# Altium footprint library Footprint-Lib-PhilsLab.PcbLib: 544 footprints (part 16 of 34)
Each footprint in its own frame and in the unit in brackets; x right, y up, seen from the top. Pads: shape width x height; smd on the part's side, far side on the other; paste and mask are expansions set on the pad; w line width, h text height; cw(c..) or ccw(c..) is an arc to the next point about the centre after c.
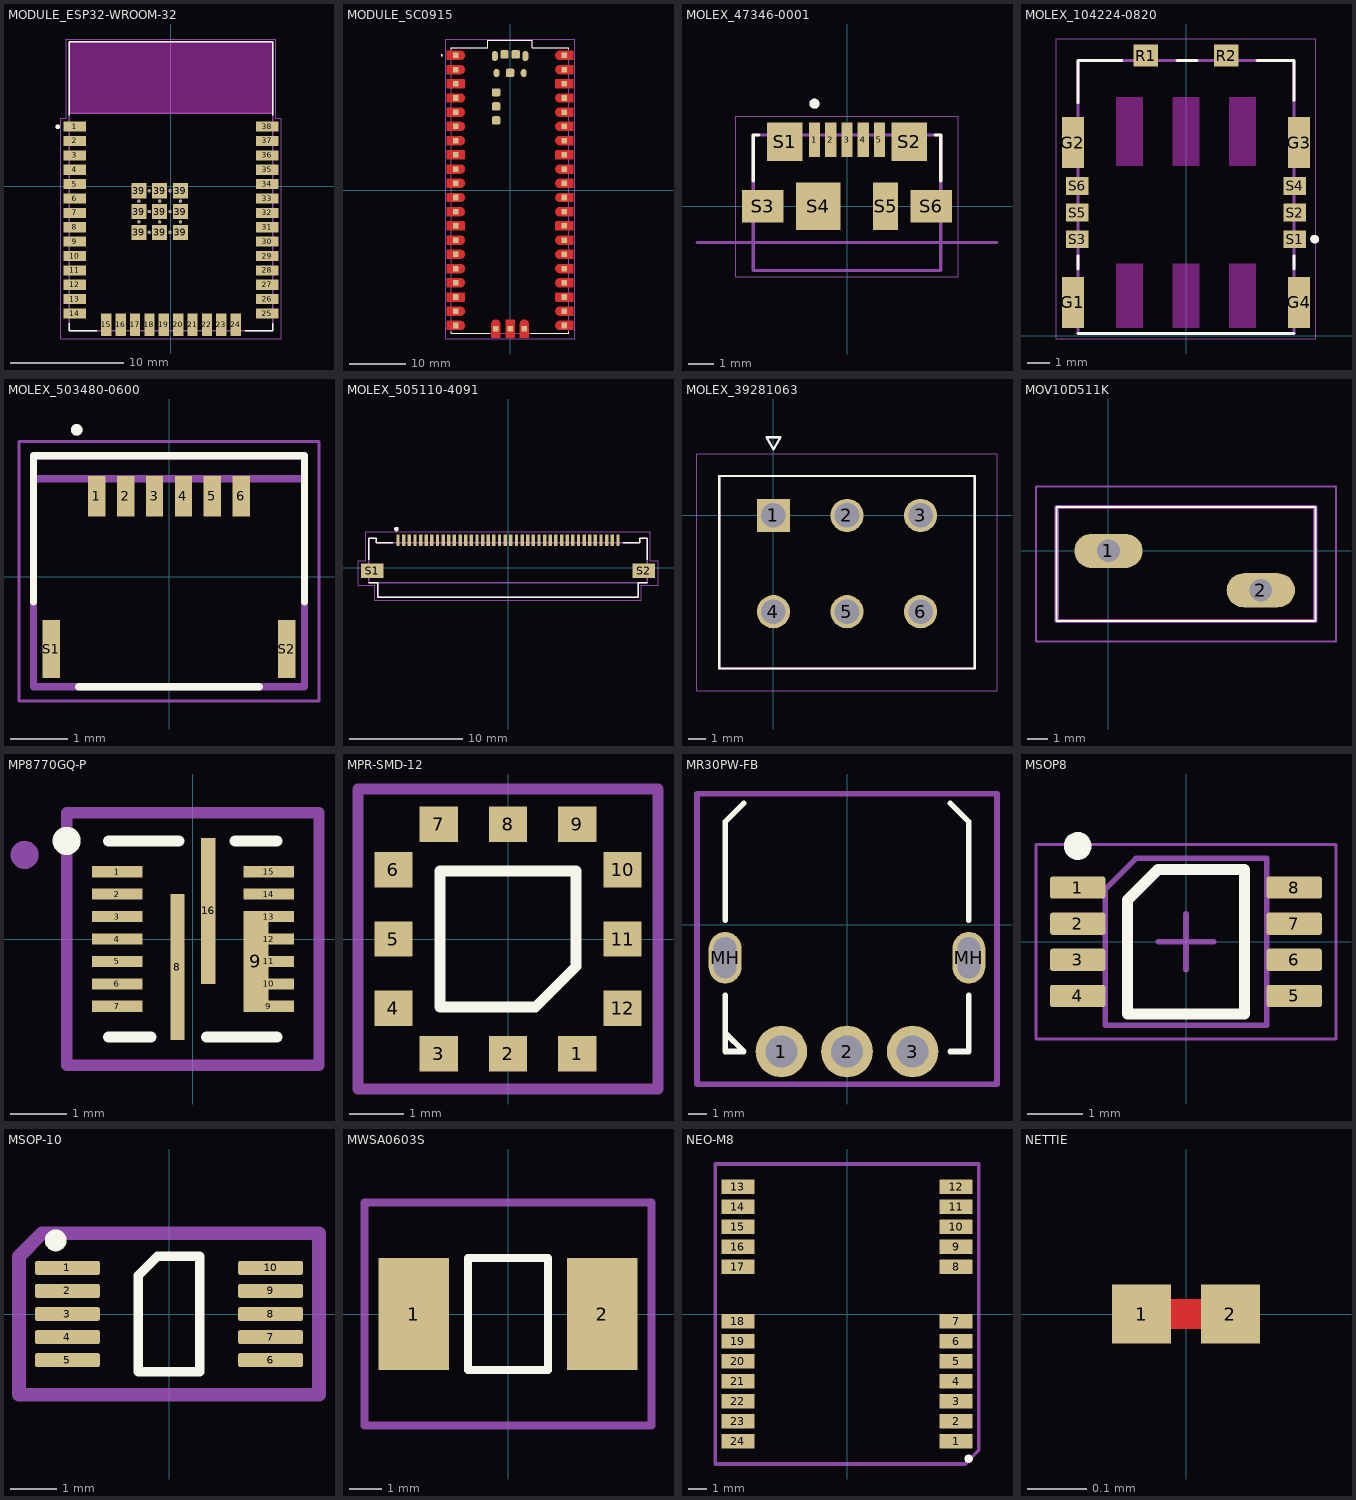
[diagram p15: the footprints below, top view; thin cyan lines are the x and y axes]

## MODULE_ESP32-WROOM-32 [mm]
height 3.2
pads (59):
  rect 2x0.9 smd: 1(-8.5,5.26) 2(-8.5,3.99) 3(-8.5,2.72) 4(-8.5,1.45) 5(-8.5,0.18) 6(-8.5,-1.09) 7(-8.5,-2.36) 8(-8.5,-3.63) 9(-8.5,-4.9) 10(-8.5,-6.17) 11(-8.5,-7.44) 12(-8.5,-8.71) 13(-8.5,-9.98) 14(-8.5,-11.25) 25(8.5,-11.25) 26(8.5,-9.98) 27(8.5,-8.71) 28(8.5,-7.44) 29(8.5,-6.17) 30(8.5,-4.9) 31(8.5,-3.63) 32(8.5,-2.36) 33(8.5,-1.09) 34(8.5,0.18) 35(8.5,1.45) 36(8.5,2.72) 37(8.5,3.99) 38(8.5,5.26)
  rect 0.9x2 smd: 15(-5.715,-12.25) 16(-4.445,-12.25) 17(-3.175,-12.25) 18(-1.905,-12.25) 19(-0.635,-12.25) 20(0.635,-12.25) 21(1.905,-12.25) 22(3.175,-12.25) 23(4.445,-12.25) 24(5.715,-12.25)
  rect 1.33x1.33 smd: 39(-2.835,-4.075) 39(-2.835,-2.24) 39(-2.835,-0.405) 39(-1,-4.075) 39(-1,-2.24) 39(-1,-0.405) 39(0.835,-4.075) 39(0.835,-2.24) 39(0.835,-0.405)
  round 0.3 hole 0.2: 39(-2.835,-3.157) 39(-2.835,-1.322) 39(-1.917,-4.075) 39(-1.917,-2.24) 39(-1.917,-0.405) 39(-1,-3.157) 39(-1,-1.322) 39(-0.082,-4.075) 39(-0.082,-2.24) 39(-0.082,-0.405) 39(0.835,-3.157) 39(0.835,-1.322)
Top Overlay:
  circle w0.2: c-10,5.25 r0.1
  lines w0.127: -9,-12.1 -9,-12.75 -6.55,-12.75 ; -9,6.25 -9,12.75 9,12.75 9,6.25 ; 6.55,-12.75 9,-12.75 9,-12.1
Keep-Out Layer:
  region: 9,6.45 -9,6.45 -9,12.75 9,12.75
  region: 9,6.45 -9,6.45 -9,12.75 9,12.75
Mechanical 13:
  circle w0.2: c-10,5.25 r0.1
  lines w0.127: -9,6.45 -9,-12.75 9,-12.75 9,6.45 ; -9,6.45 -9,12.75 9,12.75 9,6.45 ; -9,6.45 9,6.45
  text "ANTENNA" at -6,9 h1.78
Mechanical 15:
  lines w0.05: -9.75,-13.5 9.75,-13.5 9.75,6 9.25,6 9.25,13 -9.25,13 -9.25,6 -9.75,6 -9.75,-13.5
3D body "step_temp.STEP": height 3.2, standoff 0, extent -9,-12.75 9,12.75

## MODULE_SC0915 [mm]
pads (53):
  rect 1x1 smd paste-1 mask+0: 1(-9.69,24.13) 2(-9.69,21.59) 3(-9.69,19.05) 4(-9.69,16.51) 5(-9.69,13.97) 6(-9.69,11.43) 7(-9.69,8.89) 8(-9.69,6.35) 9(-9.69,3.81) 10(-9.69,1.27) 11(-9.69,-1.27) 12(-9.69,-3.81) 13(-9.69,-6.35) 14(-9.69,-8.89) 15(-9.69,-11.43) 16(-9.69,-13.97) 17(-9.69,-16.51) 18(-9.69,-19.05) 19(-9.69,-21.59) 20(-9.69,-24.13) 21(9.69,-24.13) 22(9.69,-21.59) 23(9.69,-19.05) 24(9.69,-16.51) 25(9.69,-13.97) 26(9.69,-11.43) 27(9.69,-8.89) 28(9.69,-6.35) 29(9.69,-3.81) 30(9.69,-1.27) 31(9.69,1.27) 32(9.69,3.81) 33(9.69,6.35) 34(9.69,8.89) 35(9.69,11.43) 36(9.69,13.97) 37(9.69,16.51) 38(9.69,19.05) 39(9.69,21.59) 40(9.69,24.13) D1(-2.54,-24.7) D2(0,-24.7) D3(2.54,-24.7)
  oval 1.1x1.8 smd: A(-2.725,24) B(2.725,24)
  oval 1.05x1.45 smd: C(-2.425,20.97) D(2.425,20.97)
  rrect40% 1.5x1.5 smd: TP1(0,21) TP2(1,24.3) TP3(-1,24.3) TP4(-2.5,17.5) TP5(-2.5,15) TP6(-2.5,12.5)
Top Layer:
  drawing of 43 lines, arcs and shapes, not listed
Top Overlay:
  circle w0.2: c-12.19,24.13 r0.1
  lines w0.127: -10.5,-25.25 -10.5,-25.5 -3.66,-25.5 ; -10.5,25.25 -10.5,25.5 -4,25.5 -4,26.8 4,26.8 4,25.5 10.5,25.5 10.5,25.25 ; 3.66,-25.5 10.5,-25.5 10.5,-25.25
Top Paste:
  drawing of 43 lines, arcs and shapes, not listed
Top Solder:
  drawing of 43 lines, arcs and shapes, not listed
Mechanical 13:
  circle w0.2: c-12.19,24.13 r0.1
  lines w0.127: -10.5,-25.5 -10.5,25.5 -4,25.5 -4,26.8 4,26.8 4,25.5 10.5,25.5 10.5,-25.5 -10.5,-25.5
Mechanical 15:
  lines w0.05: -11.54,-26.55 -11.54,27.05 11.54,27.05 11.54,-26.55 -11.54,-26.55
3D body "step_temp.STEP": height 3.73, standoff 0, extent -10.5,-25.5 10.5,26.8

## MOLEX_47346-0001 [mm]
height 2.94
pads (11):
  rect 0.45x1.38 smd: 1(-1.3,2.66) 2(-0.65,2.66) 3(0,2.66) 4(0.65,2.66) 5(1.3,2.66)
  rect 1.425x1.55 smd: S1(-2.488,2.575) S2(2.488,2.575)
  rect 1.65x1.3 smd: S3(-3.375,0) S6(3.375,0)
  rect 1.8x1.9 smd: S4(-1.15,0)
  rect 1x1.9 smd: S5(1.55,0)
Top Overlay:
  circle w0.2: c-1.3,4.1 r0.1
  lines w0.127: -3.75,1 -3.75,2.85 -3.52,2.85 ; 3.52,2.85 3.75,2.85 3.75,1
Mechanical 13:
  circle w0.2: c-1.3,4.1 r0.1
  lines w0.127: -6,-1.45 6,-1.45 ; -3.75,-2.58 3.75,-2.58 3.75,2.85 -3.75,2.85 -3.75,-2.58
  text "PCB EDGE" at 4.5,-1.25 h0.41
Mechanical 15:
  lines w0.05: -4.45,-2.83 -4.45,3.6 4.45,3.6 4.45,-2.83 -4.45,-2.83
3D body "step_temp.STEP": height 2.7, standoff -0.25, extent -4.18,-2.93 4.18,2.5

## MOLEX_104224-0820 [mm]
pads (12):
  rect 1x2.3 smd: G1(-5.1,1.5) G2(-5.1,8.7) G3(5.1,8.7) G4(5.1,1.5)
  rect 1.1x1 smd: R1(-1.82,12.625) R2(1.82,12.625)
  rect 1x0.8 smd: S1(4.9,4.35) S2(4.9,5.55) S3(-4.9,4.35) S4(4.9,6.75) S5(-4.9,5.55) S6(-4.9,6.75)
Top Overlay:
  circle w0.2: c5.8,4.35 r0.1
  lines w0.127: -4.875,0.1 4.875,0.1 ; -4.875,3 -4.875,3.6 ; -4.875,10.5 -4.875,12.4 -2.9,12.4 ; -0.4,12.4 0.5,12.4 ; 3.2,12.4 4.875,12.4 4.875,10.6 ; 4.875,3 4.875,3.6
Keep-Out Layer:
  region: 3.14,7.652 1.94,7.652 1.94,10.75 3.14,10.75
  region: -1.94,7.656 -3.142,7.656 -3.142,10.75 -1.94,10.75
  region: 0.6,7.663 -0.601,7.663 -0.601,10.75 0.6,10.75
  region: 3.14,0.351 1.943,0.351 1.943,3.25 3.14,3.25
  region: -1.94,0.351 -3.146,0.351 -3.146,3.25 -1.94,3.25
  region: 0.6,0.35 -0.601,0.35 -0.601,3.25 0.6,3.25
Mechanical 13:
  lines w0.127: -4.9,0.6 -5.275,0.6 -5.275,2.4 -4.9,2.4 ; -4.9,4.15 -5.1,4.15 -5.1,4.55 -4.9,4.55 ; -4.9,5.35 -5.1,5.35 -5.1,5.75 -4.9,5.75 ; -4.9,6.55 -5.1,6.55 -5.1,6.95 -4.9,6.95 ; -4.9,7.8 -5.275,7.8 -5.275,9.6 -4.9,9.6 ; 4.9,0.6 5.275,0.6 5.275,2.4 4.9,2.4 ; 4.9,4.15 5.1,4.15 5.1,4.55 4.9,4.55 ; 4.9,5.35 5.1,5.35 5.1,5.75 4.9,5.75 ; 4.9,6.55 5.1,6.55 5.1,6.95 4.9,6.95 ; 4.9,7.8 5.275,7.8 5.275,9.6 4.9,9.6 ; -2.12,12.4 -2.12,12.8 -1.52,12.8 -1.52,12.4 ; -2.12,12.4 -1.52,12.4 ; -2.12,12.4 -4.875,12.4 -4.875,0.1 4.875,0.1 4.875,12.4 2.12,12.4 ; -1.52,12.4 1.52,12.4 ; 1.52,12.4 1.52,12.8 2.12,12.8 2.12,12.4 ; 1.52,12.4 2.12,12.4
Mechanical 15:
  lines w0.05: -5.85,-0.15 -5.85,13.375 5.85,13.375 5.85,-0.15 -5.85,-0.15
3D body "step_temp.STEP": height 1.21, standoff 0, extent -5.2,-0.025 5.15,12.625

## MOLEX_503480-0600 [mm]
pads (8):
  rect 0.3x0.7 smd: 1(-1.25,1.4) 2(-0.75,1.4) 3(-0.25,1.4) 4(0.25,1.4) 5(0.75,1.4) 6(1.25,1.4)
  rect 0.3x1 smd: S1(-2.04,-1.25) S2(2.04,-1.25)
Top Overlay:
  circle w0.1: c-1.6,2.55 r0.05
  lines w0.127: -2.35,-0.43 -2.35,2.1 2.35,2.1 2.35,-0.43 ; -1.57,-1.9 1.57,-1.9
Mechanical 13:
  circle w0.1: c-1.6,2.55 r0.05
  lines w0.127: -2.35,1.7 -2.35,2.1 2.35,2.1 2.35,1.7 ; -2.35,1.7 -2.35,-1.9 2.35,-1.9 2.35,1.7 ; -2.35,1.7 2.35,1.7
Mechanical 15:
  lines w0.05: -2.6,-2.15 2.6,-2.15 2.6,2.35 -2.6,2.35 -2.6,-2.15

## MOLEX_505110-4091 [mm]
pads (42):
  rect 0.3x1 smd: 1(-9.75,2.425) 2(-9.25,2.425) 3(-8.75,2.425) 4(-8.25,2.425) 5(-7.75,2.425) 6(-7.25,2.425) 7(-6.75,2.425) 8(-6.25,2.425) 9(-5.75,2.425) 10(-5.25,2.425) 11(-4.75,2.425) 12(-4.25,2.425) 13(-3.75,2.425) 14(-3.25,2.425) 15(-2.75,2.425) 16(-2.25,2.425) 17(-1.75,2.425) 18(-1.25,2.425) 19(-0.75,2.425) 20(-0.25,2.425) 21(0.25,2.425) 22(0.75,2.425) 23(1.25,2.425) 24(1.75,2.425) 25(2.25,2.425) 26(2.75,2.425) 27(3.25,2.425) 28(3.75,2.425) 29(4.25,2.425) 30(4.75,2.425) 31(5.25,2.425) 32(5.75,2.425) 33(6.25,2.425) 34(6.75,2.425) 35(7.25,2.425) 36(7.75,2.425) 37(8.25,2.425) 38(8.75,2.425) 39(9.25,2.425) 40(9.75,2.425)
  rect 2x1.3 smd: S1(-12.05,-0.275) S2(12.05,-0.275)
Top Overlay:
  circle w0.2: c-9.9,3.425 r0.1
  lines w0.127: -12.35,-1.325 -11.55,-1.325 -11.55,-2.625 11.55,-2.625 11.55,-1.325 12.35,-1.325 ; -12.35,0.695 -12.35,2.625 -11.7,2.625 -11.7,2.225 -10.22,2.225 ; 10.22,2.225 11.7,2.225 11.7,2.625 12.35,2.625 12.35,0.695
Mechanical 13:
  circle w0.2: c-9.9,3.425 r0.1
  lines w0.127: -11.55,-1.325 11.55,-1.325 ; -11.55,-1.325 -11.55,-2.625 11.55,-2.625 11.55,-1.325 ; -11.55,-1.325 -12.35,-1.325 -12.35,2.625 -11.7,2.625 -11.7,2.225 11.7,2.225 11.7,2.625 12.35,2.625 12.35,-1.325 11.55,-1.325
Mechanical 15:
  lines w0.05: -13.3,-1.575 -13.3,0.625 -12.6,0.625 -12.6,3.175 12.6,3.175 12.6,0.625 13.3,0.625 13.3,-1.575 11.8,-1.575 11.8,-2.875 -11.8,-2.875 -11.8,-1.575 -13.3,-1.575
3D body "5051104091.stp": height 1.88, standoff -0.02, extent -13.22,-2.67 12.28,2.63

## MOLEX_39281063 [mm]
height 12.8
pads (6):
  rect 1.9x1.9 / inner round 1.9 / far side rect 1.9x1.9 hole 1.4 mask+0.076: 1(0,0)
  round 1.9 hole 1.4 mask+0.076: 2(4.2,0) 3(8.4,0) 4(0,-5.5) 5(4.2,-5.5) 6(8.4,-5.5)
Top Overlay:
  lines w0.127: -3.1,-8.75 11.5,-8.75 11.5,2.25 -3.1,2.25 -3.1,-8.75 ; -0.4,4.47 0,3.77 0.4,4.47 -0.4,4.47
Mechanical 13:
  lines w0.127: -3.1,-8.75 11.5,-8.75 11.5,2.25 -3.1,2.25 -3.1,-8.75 ; -0.4,4.47 0,3.77 0.4,4.47 -0.4,4.47
  text "PTH D1.40 +/- 0.05" at -4.4,-13 h0.5
Mechanical 15:
  lines w0.05: -4.37,-10.02 12.77,-10.02 12.77,3.52 -4.37,3.52 -4.37,-10.02
3D body "039281063.stp": height 12.8, standoff -3.5, extent -3.14,-7.72 11.457,3.28

## MOV10D511K [mm]
pads (2):
  oval 3.3x1.65 hole 1.1: 1(0,0) 2(7.366,-1.905)
Top Overlay:
  lines w0.1: -2.5,-3.385 10,-3.385 10,2.115 -2.5,2.115 -2.5,-3.385
Mechanical 13:
  lines w0.1: -3.5,-4.385 11,-4.385 11,3.115 -3.5,3.115 -3.5,-4.385
  lines w0.2: -2.5,-3.385 10,-3.385 10,2.115 -2.5,2.115 -2.5,-3.385
3D body "step_temp.STEP": height 15.5, standoff -17, extent -2.313,-2.635 10.187,1.365

## MP8770GQ-P [mm]
pads (17):
  rect 0.9x0.2 smd: 1(-1.35,1.2) 2(-1.35,0.8) 3(-1.35,0.4) 4(-1.35,0) 5(-1.35,-0.4) 6(-1.35,-0.8) 7(-1.35,-1.2) 9(1.35,-1.2) 10(1.35,-0.8) 11(1.35,-0.4) 12(1.35,0) 13(1.35,0.4) 14(1.35,0.8) 15(1.35,1.2)
  rect 0.25x2.6 smd: 8(-0.275,-0.5) 16(0.275,0.5)
  rect 0.45x1.8 smd: 9(1.125,-0.4)
Top Overlay:
  circle w0.3: c-2.25,1.75 r0.1
  lines w0.2: -1.5,-1.75 -0.75,-1.75 ; -1.5,1.75 -0.25,1.75 ; 0.25,-1.75 1.5,-1.75 ; 0.75,1.75 1.5,1.75
Mechanical 13:
  circle w0.3: c-3,1.5 r0.1
  lines w0.2: -2.25,-2.25 2.25,-2.25 2.25,2.25 -2.25,2.25 -2.25,-2.25
  text "'.Designator'" at -5.815,-0.9 h1
3D body "MP8770CGQ.step": height 0.86, standoff 0.01, extent -1.5,-1.5 1.5,1.5

## MPR-SMD-12 [mm]
pads (12):
  rect 0.7x0.65 smd mask+0.03: 1(1.27,-2.1) 2(0,-2.1) 3(-1.27,-2.1) 4(-2.1,-1.27) 5(-2.1,0) 6(-2.1,1.27) 7(-1.27,2.1) 8(0,2.1) 9(1.27,2.1) 10(2.1,1.27) 11(2.1,0) 12(2.1,-1.27)
Top Overlay:
  lines w0.2: -1.25,-1.25 0.5,-1.25 1.25,-0.5 1.25,1.25 -1.25,1.25 -1.25,-1.25
Mechanical 13:
  lines w0.2: -2.75,-2.75 2.75,-2.75 2.75,2.75 -2.75,2.75 -2.75,-2.75
  text "'.Designator'" at -5.84,-0.925 h1
3D body "MPRLS.stp": height 5.83, standoff 0.01, extent -2.444,-2.445 2.446,2.445

## MR30PW-FB [mm]
pads (5):
  round 2.75 hole 1.7: 1(-3.5,-6.75) 2(0,-6.75) 3(3.5,-6.75)
  oval 1.75x2.75 hole 1.2 slot 2.2 at 90 deg: MH(-6.5,-1.75) MH(6.5,-1.75)
Top Overlay:
  lines w0.3: -6.5,-3.75 -6.5,-6.75 -5.5,-6.75 -6.5,-5.75 ; -6.5,0.25 -6.5,5.5 -5.5,6.5 ; 5.5,-6.75 6.5,-6.75 6.5,-4 6.5,-3.75 ; 5.5,6.5 6.5,5.5 6.5,0.25 ; -6.5,-5.75 -6.5,-5.75
Mechanical 13:
  lines w0.3: -8,-8.5 -8,7 8,7 8,-8.5 -8,-8.5
  text "'.Designator'" at -5.84,-0.925 h1
3D body "MR30PW-FB.STEP": height 4.96, standoff -1.99, extent -7.7,-7.7 7.7,6.75

## MSOP8 [mm] "TSOP, 8-Leads, Body 2.90x2.80mm, Pitch 0.65mm, IPC Medium Density"
height 0.9
pads (8):
  rrect25% 1x0.4 smd mask+0.05: 1(-1.95,0.975) 2(-1.95,0.325) 3(-1.95,-0.325) 4(-1.95,-0.975) 5(1.95,-0.975) 6(1.95,-0.325) 7(1.95,0.325) 8(1.95,0.975)
Top Overlay:
  circle w0.25: c-1.95,1.725 r0.125
  lines w0.2: -1.05,-1.3 1.05,-1.3 1.05,1.3 -0.5,1.3 -1.05,0.75 -1.05,-1.3
Mechanical 13:
  lines w0.1: -1.45,-1.5 -1.45,0.95 -0.9,1.5 1.45,1.5 1.45,-1.5 -1.45,-1.5
  text "'.Designator'" at -5.815,-0.9 h1
Mechanical 15:
  lines w0.05: -2.7,-1.75 -2.7,1.75 2.7,1.75 2.7,-1.75 -2.7,-1.75
  lines w0.1: -0.5,0 0.5,0 ; 0,-0.5 0,0.5
3D body "MSOP8.step": height 0.9, standoff 0, extent -2,-1.5 2,1.5

## MSOP-10 [mm]
pads (10):
  rrect25% 1.4x0.3 smd mask+0.05: 1(-2.2,1) 2(-2.2,0.5) 3(-2.2,0) 4(-2.2,-0.5) 5(-2.2,-1) 6(2.2,-1) 7(2.2,-0.5) 8(2.2,0) 9(2.2,0.5) 10(2.2,1)
Top Overlay:
  circle w0.254: c-2.456,1.596 r0.109
  lines w0.2: -0.665,-1.25 -0.665,0.835 -0.25,1.25 0.125,1.25 0.665,1.25 0.665,-1.25 -0.665,-1.25
Mechanical 13:
  lines w0.3: -3.25,-1.75 -3.25,1.25 -2.75,1.75 3.25,1.75 3.25,-1.75 -3.25,-1.75
  text "'.Designator'" at -7.231,-1.087 h1.25
3D body "MSOP-10.step": height 1.15, standoff 0, extent -2.45,-1.5 2.45,1.5

## MWSA0603S [mm]
pads (2):
  rect 2.2x3.5 smd: 1(-2.95,0) 2(2.95,0)
Top Overlay:
  lines w0.25: -1.25,-1.75 -1.25,1.75 1.25,1.75 1.25,-1.75 -1.25,-1.75
Mechanical 13:
  lines w0.25: -4.5,-3.5 4.5,-3.5 4.5,3.5 -4.5,3.5 -4.5,-3.5
  text "'.Designator'" at -5.815,-0.9 h1
3D body "MWSA0603S.STEP": height 2.8, standoff 0, extent -3.6,-3.3 3.6,3.3

## NEO-M8 [mm]
pads (24):
  rect 1.8x0.8 smd mask+0.07: 1(6,-7) 2(6,-5.9) 3(6,-4.8) 4(6,-3.7) 5(6,-2.6) 6(6,-1.5) 7(6,-0.4) 8(6,2.6) 9(6,3.7) 10(6,4.8) 11(6,5.9) 12(6,7) 13(-6,7) 14(-6,5.9) 15(-6,4.8) 16(-6,3.7) 17(-6,2.6) 18(-6,-0.4) 19(-6,-1.5) 20(-6,-2.6) 21(-6,-3.7) 22(-6,-4.8) 23(-6,-5.9) 24(-6,-7)
Top Overlay:
  circle w0.25: c6.693,-7.961 r0.105
Mechanical 13:
  lines w0.2: -7.25,-8.25 -7.25,-8 -7.25,8.25 7.25,8.25 7.25,-7.5 6.5,-8.25 -7.25,-8.25
  text "'.Designator'" at -5.84,-0.925 h1
3D body "NEO-M8.step": height 2.4, standoff 0, extent -6.1,-8 6.1,8

## NETTIE [mm]
pads (2):
  rect 0.1x0.1 smd paste-1 mask-1: 1(-0.075,0) 2(0.075,0)
Top Layer:
  rectangle: -0.048,-0.025 0.048,0.025